# Altium footprint library 2.11-TQFP封装.PcbLib: 71 footprints (part 4 of 5)
Each footprint in its own frame and in the unit in brackets; x right, y up, seen from the top. Pads: shape width x height; smd on the part's side, far side on the other; paste and mask are expansions set on the pad; w line width, h text height; cw(c..) or ccw(c..) is an arc to the next point about the centre after c.
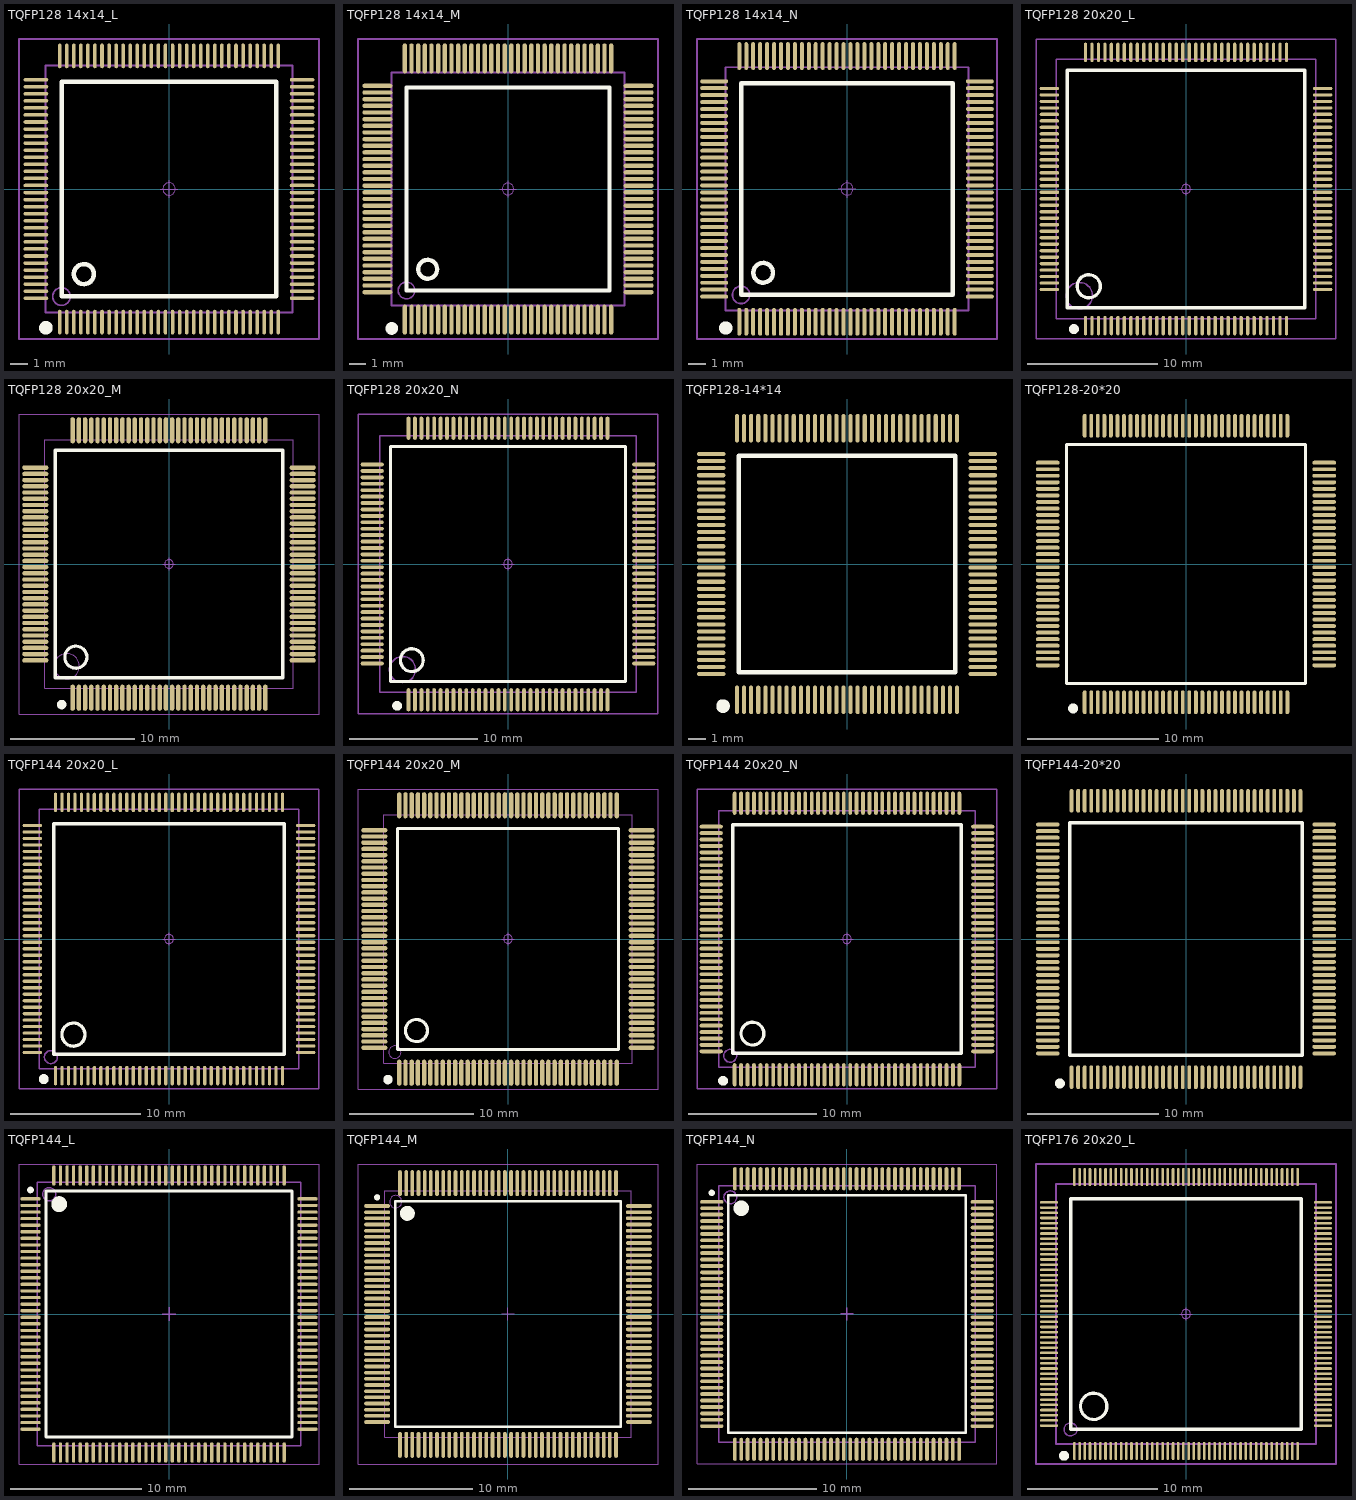
[diagram p3: the footprints below, top view; thin cyan lines are the x and y axes]

## TQFP128 14x14_L [mm] "128脚，体宽：14x14mm, 脚距：0.4mm"
pads (128):
  oval 0.2x1.4 smd: 1(-6.2,-7.549) 2(-5.8,-7.549) 3(-5.4,-7.549) 4(-5,-7.549) 5(-4.6,-7.549) 6(-4.2,-7.549) 7(-3.8,-7.549) 8(-3.4,-7.549) 9(-3,-7.549) 10(-2.6,-7.549) 11(-2.2,-7.549) 12(-1.8,-7.549) 13(-1.4,-7.549) 14(-1,-7.549) 15(-0.6,-7.549) 16(-0.2,-7.549) 17(0.2,-7.549) 18(0.6,-7.549) 19(1,-7.549) 20(1.4,-7.549) 21(1.8,-7.549) 22(2.2,-7.549) 23(2.6,-7.549) 24(3,-7.549) 25(3.4,-7.549) 26(3.8,-7.549) 27(4.2,-7.549) 28(4.6,-7.549) 29(5,-7.549) 30(5.4,-7.549) 31(5.8,-7.549) 32(6.2,-7.549) 65(6.2,7.549) 66(5.8,7.549) 67(5.4,7.549) 68(5,7.549) 69(4.6,7.549) 70(4.2,7.549) 71(3.8,7.549) 72(3.4,7.549) 73(3,7.549) 74(2.6,7.549) 75(2.2,7.549) 76(1.8,7.549) 77(1.4,7.549) 78(1,7.549) 79(0.6,7.549) 80(0.2,7.549) 81(-0.2,7.549) 82(-0.6,7.549) 83(-1,7.549) 84(-1.4,7.549) 85(-1.8,7.549) 86(-2.2,7.549) 87(-2.6,7.549) 88(-3,7.549) 89(-3.4,7.549) 90(-3.8,7.549) 91(-4.2,7.549) 92(-4.6,7.549) 93(-5,7.549) 94(-5.4,7.549) 95(-5.8,7.549) 96(-6.2,7.549)
  oval 1.4x0.2 smd: 33(7.549,-6.2) 34(7.549,-5.8) 35(7.549,-5.4) 36(7.549,-5) 37(7.549,-4.6) 38(7.549,-4.2) 39(7.549,-3.8) 40(7.549,-3.4) 41(7.549,-3) 42(7.549,-2.6) 43(7.549,-2.2) 44(7.549,-1.8) 45(7.549,-1.4) 46(7.549,-1) 47(7.549,-0.6) 48(7.549,-0.2) 49(7.549,0.2) 50(7.549,0.6) 51(7.549,1) 52(7.549,1.4) 53(7.549,1.8) 54(7.549,2.2) 55(7.549,2.6) 56(7.549,3) 57(7.549,3.4) 58(7.549,3.8) 59(7.549,4.2) 60(7.549,4.6) 61(7.549,5) 62(7.549,5.4) 63(7.549,5.8) 64(7.549,6.2) 97(-7.549,6.2) 98(-7.549,5.8) 99(-7.549,5.4) 100(-7.549,5) 101(-7.549,4.6) 102(-7.549,4.2) 103(-7.549,3.8) 104(-7.549,3.4) 105(-7.549,3) 106(-7.549,2.6) 107(-7.549,2.2) 108(-7.549,1.8) 109(-7.549,1.4) 110(-7.549,1) 111(-7.549,0.6) 112(-7.549,0.2) 113(-7.549,-0.2) 114(-7.549,-0.6) 115(-7.549,-1) 116(-7.549,-1.4) 117(-7.549,-1.8) 118(-7.549,-2.2) 119(-7.549,-2.6) 120(-7.549,-3) 121(-7.549,-3.4) 122(-7.549,-3.8) 123(-7.549,-4.2) 124(-7.549,-4.6) 125(-7.549,-5) 126(-7.549,-5.4) 127(-7.549,-5.8) 128(-7.549,-6.2)
Top Overlay:
  circle w0.254: c-4.826,-4.826 r0.568
  circle w0.508: c-6.985,-7.874 r0.127
  lines w0.254: -6.096,-6.096 -6.096,6.096 6.096,6.096 6.096,-6.096 -6.096,-6.096
Mechanical 13:
  circle w0.1: c-6.1,-6.1 r0.5
  lines w0.1: -7,-7 7,-7 7,7 -7,7 -7,-7
Mechanical 15:
  circle w0.05: c0,0 r0.35
  lines w0.05: -0.5,0 0.5,0 ; 0,-0.5 0,0.5
  lines w0.1: -8.509,-8.509 -8.509,8.509 8.509,8.509 8.509,-8.509 -8.509,-8.509
3D body "TQFP128 14x14.STEP": height 1.05, standoff -0.01, extent -8.002,-8.002 8.002,8.002

## TQFP128 14x14_M [mm] "128脚，体宽：14x14mm, 脚距：0.4mm"
pads (128):
  oval 0.26x1.8 smd: 1(-6.2,-7.854) 2(-5.8,-7.854) 3(-5.4,-7.854) 4(-5,-7.854) 5(-4.6,-7.854) 6(-4.2,-7.854) 7(-3.8,-7.854) 8(-3.4,-7.854) 9(-3,-7.854) 10(-2.6,-7.854) 11(-2.2,-7.854) 12(-1.8,-7.854) 13(-1.4,-7.854) 14(-1,-7.854) 15(-0.6,-7.854) 16(-0.2,-7.854) 17(0.2,-7.854) 18(0.6,-7.854) 19(1,-7.854) 20(1.4,-7.854) 21(1.8,-7.854) 22(2.2,-7.854) 23(2.6,-7.854) 24(3,-7.854) 25(3.4,-7.854) 26(3.8,-7.854) 27(4.2,-7.854) 28(4.6,-7.854) 29(5,-7.854) 30(5.4,-7.854) 31(5.8,-7.854) 32(6.2,-7.854) 65(6.2,7.854) 66(5.8,7.854) 67(5.4,7.854) 68(5,7.854) 69(4.6,7.854) 70(4.2,7.854) 71(3.8,7.854) 72(3.4,7.854) 73(3,7.854) 74(2.6,7.854) 75(2.2,7.854) 76(1.8,7.854) 77(1.4,7.854) 78(1,7.854) 79(0.6,7.854) 80(0.2,7.854) 81(-0.2,7.854) 82(-0.6,7.854) 83(-1,7.854) 84(-1.4,7.854) 85(-1.8,7.854) 86(-2.2,7.854) 87(-2.6,7.854) 88(-3,7.854) 89(-3.4,7.854) 90(-3.8,7.854) 91(-4.2,7.854) 92(-4.6,7.854) 93(-5,7.854) 94(-5.4,7.854) 95(-5.8,7.854) 96(-6.2,7.854)
  oval 1.8x0.26 smd: 33(7.854,-6.2) 34(7.854,-5.8) 35(7.854,-5.4) 36(7.854,-5) 37(7.854,-4.6) 38(7.854,-4.2) 39(7.854,-3.8) 40(7.854,-3.4) 41(7.854,-3) 42(7.854,-2.6) 43(7.854,-2.2) 44(7.854,-1.8) 45(7.854,-1.4) 46(7.854,-1) 47(7.854,-0.6) 48(7.854,-0.2) 49(7.854,0.2) 50(7.854,0.6) 51(7.854,1) 52(7.854,1.4) 53(7.854,1.8) 54(7.854,2.2) 55(7.854,2.6) 56(7.854,3) 57(7.854,3.4) 58(7.854,3.8) 59(7.854,4.2) 60(7.854,4.6) 61(7.854,5) 62(7.854,5.4) 63(7.854,5.8) 64(7.854,6.2) 97(-7.854,6.2) 98(-7.854,5.8) 99(-7.854,5.4) 100(-7.854,5) 101(-7.854,4.6) 102(-7.854,4.2) 103(-7.854,3.8) 104(-7.854,3.4) 105(-7.854,3) 106(-7.854,2.6) 107(-7.854,2.2) 108(-7.854,1.8) 109(-7.854,1.4) 110(-7.854,1) 111(-7.854,0.6) 112(-7.854,0.2) 113(-7.854,-0.2) 114(-7.854,-0.6) 115(-7.854,-1) 116(-7.854,-1.4) 117(-7.854,-1.8) 118(-7.854,-2.2) 119(-7.854,-2.6) 120(-7.854,-3) 121(-7.854,-3.4) 122(-7.854,-3.8) 123(-7.854,-4.2) 124(-7.854,-4.6) 125(-7.854,-5) 126(-7.854,-5.4) 127(-7.854,-5.8) 128(-7.854,-6.2)
Top Overlay:
  circle w0.254: c-4.826,-4.826 r0.568
  circle w0.508: c-6.985,-8.382 r0.127
  lines w0.254: -6.096,-6.096 -6.096,6.096 6.096,6.096 6.096,-6.096 -6.096,-6.096
Mechanical 13:
  circle w0.1: c-6.1,-6.1 r0.5
  lines w0.1: -7,-7 7,-7 7,7 -7,7 -7,-7
Mechanical 15:
  circle w0.05: c0,0 r0.35
  lines w0.05: -0.5,0 0.5,0 ; 0,-0.5 0,0.5
  lines w0.1: -9.017,-9.017 -9.017,9.017 9.017,9.017 9.017,-9.017 -9.017,-9.017
3D body "TQFP128 14x14.STEP": height 1.05, standoff -0.01, extent -8.002,-8.002 8.002,8.002

## TQFP128 14x14_N [mm] "128脚，体宽：14x14mm, 脚距：0.4mm"
pads (128):
  oval 0.23x1.6 smd: 1(-6.2,-7.648) 2(-5.8,-7.648) 3(-5.4,-7.648) 4(-5,-7.648) 5(-4.6,-7.648) 6(-4.2,-7.648) 7(-3.8,-7.648) 8(-3.4,-7.648) 9(-3,-7.648) 10(-2.6,-7.648) 11(-2.2,-7.648) 12(-1.8,-7.648) 13(-1.4,-7.648) 14(-1,-7.648) 15(-0.6,-7.648) 16(-0.2,-7.648) 17(0.2,-7.648) 18(0.6,-7.648) 19(1,-7.648) 20(1.4,-7.648) 21(1.8,-7.648) 22(2.2,-7.648) 23(2.6,-7.648) 24(3,-7.648) 25(3.4,-7.648) 26(3.8,-7.648) 27(4.2,-7.648) 28(4.6,-7.648) 29(5,-7.648) 30(5.4,-7.648) 31(5.8,-7.648) 32(6.2,-7.648) 65(6.2,7.653) 66(5.8,7.653) 67(5.4,7.653) 68(5,7.653) 69(4.6,7.653) 70(4.2,7.653) 71(3.8,7.653) 72(3.4,7.653) 73(3,7.653) 74(2.6,7.653) 75(2.2,7.653) 76(1.8,7.653) 77(1.4,7.653) 78(1,7.653) 79(0.6,7.653) 80(0.2,7.653) 81(-0.2,7.653) 82(-0.6,7.653) 83(-1,7.653) 84(-1.4,7.653) 85(-1.8,7.653) 86(-2.2,7.653) 87(-2.6,7.653) 88(-3,7.653) 89(-3.4,7.653) 90(-3.8,7.653) 91(-4.2,7.653) 92(-4.6,7.653) 93(-5,7.653) 94(-5.4,7.653) 95(-5.8,7.653) 96(-6.2,7.653)
  oval 1.6x0.23 smd: 33(7.651,-6.198) 34(7.651,-5.798) 35(7.651,-5.398) 36(7.651,-4.998) 37(7.651,-4.598) 38(7.651,-4.198) 39(7.651,-3.798) 40(7.651,-3.398) 41(7.651,-2.998) 42(7.651,-2.598) 43(7.651,-2.198) 44(7.651,-1.798) 45(7.651,-1.398) 46(7.651,-0.998) 47(7.651,-0.598) 48(7.651,-0.198) 49(7.651,0.202) 50(7.651,0.602) 51(7.651,1.002) 52(7.651,1.402) 53(7.651,1.802) 54(7.651,2.202) 55(7.651,2.602) 56(7.651,3.002) 57(7.651,3.402) 58(7.651,3.802) 59(7.651,4.202) 60(7.651,4.602) 61(7.651,5.002) 62(7.651,5.402) 63(7.651,5.802) 64(7.651,6.202) 97(-7.651,6.202) 98(-7.651,5.802) 99(-7.651,5.402) 100(-7.651,5.002) 101(-7.651,4.602) 102(-7.651,4.202) 103(-7.651,3.802) 104(-7.651,3.402) 105(-7.651,3.002) 106(-7.651,2.602) 107(-7.651,2.202) 108(-7.651,1.802) 109(-7.651,1.402) 110(-7.651,1.002) 111(-7.651,0.602) 112(-7.651,0.202) 113(-7.651,-0.198) 114(-7.651,-0.598) 115(-7.651,-0.998) 116(-7.651,-1.398) 117(-7.651,-1.798) 118(-7.651,-2.198) 119(-7.651,-2.598) 120(-7.651,-2.998) 121(-7.651,-3.398) 122(-7.651,-3.798) 123(-7.651,-4.198) 124(-7.651,-4.598) 125(-7.651,-4.998) 126(-7.651,-5.398) 127(-7.651,-5.798) 128(-7.651,-6.198)
Top Overlay:
  circle w0.254: c-4.826,-4.824 r0.568
  circle w0.508: c-6.985,-8.001 r0.127
  lines w0.254: -6.096,-6.094 -6.096,6.098 6.096,6.098 6.096,-6.094 -6.096,-6.094
Mechanical 13:
  circle w0.1: c-6.1,-6.098 r0.5
  lines w0.1: -7,-6.998 7,-6.998 7,7.002 -7,7.002 -7,-6.998
Mechanical 15:
  circle w0.05: c0,0.002 r0.35
  lines w0.05: -0.5,0.002 0.5,0.002 ; 0,-0.498 0,0.502
  lines w0.1: -8.636,-8.636 -8.636,8.636 8.636,8.636 8.636,-8.636 -8.636,-8.636
3D body "TQFP128 14x14.STEP": height 1.05, standoff -0.01, extent -8.002,-8 8.002,8.005

## TQFP128 20x20_L [mm] "128脚，体宽：20x20mm, 脚距：0.5mm"
pads (128):
  oval 0.25x1.5 smd: 1(-7.75,-10.525) 2(-7.25,-10.525) 3(-6.75,-10.525) 4(-6.25,-10.525) 5(-5.75,-10.525) 6(-5.25,-10.525) 7(-4.75,-10.525) 8(-4.25,-10.525) 9(-3.75,-10.525) 10(-3.25,-10.525) 11(-2.75,-10.525) 12(-2.25,-10.525) 13(-1.75,-10.525) 14(-1.25,-10.525) 15(-0.75,-10.525) 16(-0.25,-10.525) 17(0.25,-10.525) 18(0.75,-10.525) 19(1.25,-10.525) 20(1.75,-10.525) 21(2.25,-10.525) 22(2.75,-10.525) 23(3.25,-10.525) 24(3.75,-10.525) 25(4.25,-10.525) 26(4.75,-10.525) 27(5.25,-10.525) 28(5.75,-10.525) 29(6.25,-10.525) 30(6.75,-10.525) 31(7.25,-10.525) 32(7.75,-10.525) 65(7.75,10.525) 66(7.25,10.525) 67(6.75,10.525) 68(6.25,10.525) 69(5.75,10.525) 70(5.25,10.525) 71(4.75,10.525) 72(4.25,10.525) 73(3.75,10.525) 74(3.25,10.525) 75(2.75,10.525) 76(2.25,10.525) 77(1.75,10.525) 78(1.25,10.525) 79(0.75,10.525) 80(0.25,10.525) 81(-0.25,10.525) 82(-0.75,10.525) 83(-1.25,10.525) 84(-1.75,10.525) 85(-2.25,10.525) 86(-2.75,10.525) 87(-3.25,10.525) 88(-3.75,10.525) 89(-4.25,10.525) 90(-4.75,10.525) 91(-5.25,10.525) 92(-5.75,10.525) 93(-6.25,10.525) 94(-6.75,10.525) 95(-7.25,10.525) 96(-7.75,10.525)
  oval 1.5x0.25 smd: 33(10.525,-7.75) 34(10.525,-7.25) 35(10.525,-6.75) 36(10.525,-6.25) 37(10.525,-5.75) 38(10.525,-5.25) 39(10.525,-4.75) 40(10.525,-4.25) 41(10.525,-3.75) 42(10.525,-3.25) 43(10.525,-2.75) 44(10.525,-2.25) 45(10.525,-1.75) 46(10.525,-1.25) 47(10.525,-0.75) 48(10.525,-0.25) 49(10.525,0.25) 50(10.525,0.75) 51(10.525,1.25) 52(10.525,1.75) 53(10.525,2.25) 54(10.525,2.75) 55(10.525,3.25) 56(10.525,3.75) 57(10.525,4.25) 58(10.525,4.75) 59(10.525,5.25) 60(10.525,5.75) 61(10.525,6.25) 62(10.525,6.75) 63(10.525,7.25) 64(10.525,7.75) 97(-10.525,7.75) 98(-10.525,7.25) 99(-10.525,6.75) 100(-10.525,6.25) 101(-10.525,5.75) 102(-10.525,5.25) 103(-10.525,4.75) 104(-10.525,4.25) 105(-10.525,3.75) 106(-10.525,3.25) 107(-10.525,2.75) 108(-10.525,2.25) 109(-10.525,1.75) 110(-10.525,1.25) 111(-10.525,0.75) 112(-10.525,0.25) 113(-10.525,-0.25) 114(-10.525,-0.75) 115(-10.525,-1.25) 116(-10.525,-1.75) 117(-10.525,-2.25) 118(-10.525,-2.75) 119(-10.525,-3.25) 120(-10.525,-3.75) 121(-10.525,-4.25) 122(-10.525,-4.75) 123(-10.525,-5.25) 124(-10.525,-5.75) 125(-10.525,-6.25) 126(-10.525,-6.75) 127(-10.525,-7.25) 128(-10.525,-7.75)
Top Overlay:
  circle w0.254: c-7.493,-7.493 r0.889
  circle w0.508: c-8.636,-10.795 r0.127
  lines w0.254: -9.144,-9.144 -9.144,9.144 9.144,9.144 9.144,-9.144 -9.144,-9.144
Mechanical 13:
  circle w0.1: c-8.222,-8.222 r1.016
  lines w0.1: -10,-10 10,-10 10,10 -10,10 -10,-10
Mechanical 15:
  circle w0.05: c0,0 r0.35
  lines w0.05: -0.5,0 0.5,0 ; 0,-0.5 0,0.5
  lines w0.1: -11.557,-11.557 -11.557,11.557 11.557,11.557 11.557,-11.557 -11.557,-11.557
3D body "TQFP128 20x20.STEP": height 1.05, standoff -0.01, extent -11.002,-11.002 11.002,11.002

## TQFP128 20x20_M [mm] "128脚，体宽：20x20mm, 脚距：0.5mm"
pads (128):
  oval 0.35x2.1 smd: 1(-7.75,-10.754) 2(-7.25,-10.754) 3(-6.75,-10.754) 4(-6.25,-10.754) 5(-5.75,-10.754) 6(-5.25,-10.754) 7(-4.75,-10.754) 8(-4.25,-10.754) 9(-3.75,-10.754) 10(-3.25,-10.754) 11(-2.75,-10.754) 12(-2.25,-10.754) 13(-1.75,-10.754) 14(-1.25,-10.754) 15(-0.75,-10.754) 16(-0.25,-10.754) 17(0.25,-10.754) 18(0.75,-10.754) 19(1.25,-10.754) 20(1.75,-10.754) 21(2.25,-10.754) 22(2.75,-10.754) 23(3.25,-10.754) 24(3.75,-10.754) 25(4.25,-10.754) 26(4.75,-10.754) 27(5.25,-10.754) 28(5.75,-10.754) 29(6.25,-10.754) 30(6.75,-10.754) 31(7.25,-10.754) 32(7.75,-10.754) 65(7.75,10.754) 66(7.25,10.754) 67(6.75,10.754) 68(6.25,10.754) 69(5.75,10.754) 70(5.25,10.754) 71(4.75,10.754) 72(4.25,10.754) 73(3.75,10.754) 74(3.25,10.754) 75(2.75,10.754) 76(2.25,10.754) 77(1.75,10.754) 78(1.25,10.754) 79(0.75,10.754) 80(0.25,10.754) 81(-0.25,10.754) 82(-0.75,10.754) 83(-1.25,10.754) 84(-1.75,10.754) 85(-2.25,10.754) 86(-2.75,10.754) 87(-3.25,10.754) 88(-3.75,10.754) 89(-4.25,10.754) 90(-4.75,10.754) 91(-5.25,10.754) 92(-5.75,10.754) 93(-6.25,10.754) 94(-6.75,10.754) 95(-7.25,10.754) 96(-7.75,10.754)
  oval 2.1x0.35 smd: 33(10.754,-7.75) 34(10.754,-7.25) 35(10.754,-6.75) 36(10.754,-6.25) 37(10.754,-5.75) 38(10.754,-5.25) 39(10.754,-4.75) 40(10.754,-4.25) 41(10.754,-3.75) 42(10.754,-3.25) 43(10.754,-2.75) 44(10.754,-2.25) 45(10.754,-1.75) 46(10.754,-1.25) 47(10.754,-0.75) 48(10.754,-0.25) 49(10.754,0.25) 50(10.754,0.75) 51(10.754,1.25) 52(10.754,1.75) 53(10.754,2.25) 54(10.754,2.75) 55(10.754,3.25) 56(10.754,3.75) 57(10.754,4.25) 58(10.754,4.75) 59(10.754,5.25) 60(10.754,5.75) 61(10.754,6.25) 62(10.754,6.75) 63(10.754,7.25) 64(10.754,7.75) 97(-10.754,7.75) 98(-10.754,7.25) 99(-10.754,6.75) 100(-10.754,6.25) 101(-10.754,5.75) 102(-10.754,5.25) 103(-10.754,4.75) 104(-10.754,4.25) 105(-10.754,3.75) 106(-10.754,3.25) 107(-10.754,2.75) 108(-10.754,2.25) 109(-10.754,1.75) 110(-10.754,1.25) 111(-10.754,0.75) 112(-10.754,0.25) 113(-10.754,-0.25) 114(-10.754,-0.75) 115(-10.754,-1.25) 116(-10.754,-1.75) 117(-10.754,-2.25) 118(-10.754,-2.75) 119(-10.754,-3.25) 120(-10.754,-3.75) 121(-10.754,-4.25) 122(-10.754,-4.75) 123(-10.754,-5.25) 124(-10.754,-5.75) 125(-10.754,-6.25) 126(-10.754,-6.75) 127(-10.754,-7.25) 128(-10.754,-7.75)
Top Overlay:
  circle w0.508: c-8.636,-11.303 r0.127
  circle w0.254: c-7.493,-7.493 r0.889
  lines w0.254: -9.144,-9.144 9.144,-9.144 9.144,9.144 -9.144,9.144 -9.144,-9.144
Mechanical 13:
  circle w0.1: c-8.222,-8.222 r1.016
  lines w0.1: -10,-10 -10,10 10,10 10,-10 -10,-10
Mechanical 15:
  circle w0.05: c0,0 r0.35
  lines w0.05: -0.5,0 0.5,0 ; 0,-0.5 0,0.5
  lines w0.1: -12.065,-12.065 12.065,-12.065 12.065,12.065 -12.065,12.065 -12.065,-12.065
3D body "TQFP128 20x20.STEP": height 1.05, standoff -0.01, extent -11.002,-11.002 11.002,11.002

## TQFP128 20x20_N [mm] "128脚，体宽：20x20mm, 脚距：0.5mm          淘宝ID:黄晶宝石"
pads (128):
  oval 0.3x1.8 smd: 1(-7.75,-10.576) 2(-7.25,-10.576) 3(-6.75,-10.576) 4(-6.25,-10.576) 5(-5.75,-10.576) 6(-5.25,-10.576) 7(-4.75,-10.576) 8(-4.25,-10.576) 9(-3.75,-10.576) 10(-3.25,-10.576) 11(-2.75,-10.576) 12(-2.25,-10.576) 13(-1.75,-10.576) 14(-1.25,-10.576) 15(-0.75,-10.576) 16(-0.25,-10.576) 17(0.25,-10.576) 18(0.75,-10.576) 19(1.25,-10.576) 20(1.75,-10.576) 21(2.25,-10.576) 22(2.75,-10.576) 23(3.25,-10.576) 24(3.75,-10.576) 25(4.25,-10.576) 26(4.75,-10.576) 27(5.25,-10.576) 28(5.75,-10.576) 29(6.25,-10.576) 30(6.75,-10.576) 31(7.25,-10.576) 32(7.75,-10.576) 65(7.75,10.576) 66(7.25,10.576) 67(6.75,10.576) 68(6.25,10.576) 69(5.75,10.576) 70(5.25,10.576) 71(4.75,10.576) 72(4.25,10.576) 73(3.75,10.576) 74(3.25,10.576) 75(2.75,10.576) 76(2.25,10.576) 77(1.75,10.576) 78(1.25,10.576) 79(0.75,10.576) 80(0.25,10.576) 81(-0.25,10.576) 82(-0.75,10.576) 83(-1.25,10.576) 84(-1.75,10.576) 85(-2.25,10.576) 86(-2.75,10.576) 87(-3.25,10.576) 88(-3.75,10.576) 89(-4.25,10.576) 90(-4.75,10.576) 91(-5.25,10.576) 92(-5.75,10.576) 93(-6.25,10.576) 94(-6.75,10.576) 95(-7.25,10.576) 96(-7.75,10.576)
  oval 1.8x0.3 smd: 33(10.576,-7.75) 34(10.576,-7.25) 35(10.576,-6.75) 36(10.576,-6.25) 37(10.576,-5.75) 38(10.576,-5.25) 39(10.576,-4.75) 40(10.576,-4.25) 41(10.576,-3.75) 42(10.576,-3.25) 43(10.576,-2.75) 44(10.576,-2.25) 45(10.576,-1.75) 46(10.576,-1.25) 47(10.576,-0.75) 48(10.576,-0.25) 49(10.576,0.25) 50(10.576,0.75) 51(10.576,1.25) 52(10.576,1.75) 53(10.576,2.25) 54(10.576,2.75) 55(10.576,3.25) 56(10.576,3.75) 57(10.576,4.25) 58(10.576,4.75) 59(10.576,5.25) 60(10.576,5.75) 61(10.576,6.25) 62(10.576,6.75) 63(10.576,7.25) 64(10.576,7.75) 97(-10.576,7.75) 98(-10.576,7.25) 99(-10.576,6.75) 100(-10.576,6.25) 101(-10.576,5.75) 102(-10.576,5.25) 103(-10.576,4.75) 104(-10.576,4.25) 105(-10.576,3.75) 106(-10.576,3.25) 107(-10.576,2.75) 108(-10.576,2.25) 109(-10.576,1.75) 110(-10.576,1.25) 111(-10.576,0.75) 112(-10.576,0.25) 113(-10.576,-0.25) 114(-10.576,-0.75) 115(-10.576,-1.25) 116(-10.576,-1.75) 117(-10.576,-2.25) 118(-10.576,-2.75) 119(-10.576,-3.25) 120(-10.576,-3.75) 121(-10.576,-4.25) 122(-10.576,-4.75) 123(-10.576,-5.25) 124(-10.576,-5.75) 125(-10.576,-6.25) 126(-10.576,-6.75) 127(-10.576,-7.25) 128(-10.576,-7.75)
Top Overlay:
  circle w0.508: c-8.636,-11.049 r0.127
  circle w0.254: c-7.493,-7.493 r0.889
  lines w0.254: -9.144,-9.144 -9.144,9.144 9.144,9.144 9.144,-9.144 -9.144,-9.144
Mechanical 13:
  circle w0.1: c-8.222,-8.222 r1.016
  lines w0.1: -10,-10 10,-10 10,10 -10,10 -10,-10
Mechanical 15:
  circle w0.05: c0,0 r0.35
  lines w0.05: -0.5,0 0.5,0 ; 0,-0.5 0,0.5
  lines w0.1: -11.684,-11.684 -11.684,11.684 11.684,11.684 11.684,-11.684 -11.684,-11.684
3D body "TQFP128 20x20.STEP": height 1.05, standoff -0.01, extent -11.002,-11.002 11.002,11.002

## TQFP128-14*14 [mm] "14x14mm, 0.4mm     封装库来自淘宝卖家 ID：黄晶宝石"
pads (128):
  oval 0.23x1.6 smd: 1(-6.2,-7.648) 2(-5.8,-7.648) 3(-5.4,-7.648) 4(-5,-7.648) 5(-4.6,-7.648) 6(-4.2,-7.648) 7(-3.8,-7.648) 8(-3.4,-7.648) 9(-3,-7.648) 10(-2.6,-7.648) 11(-2.2,-7.648) 12(-1.8,-7.648) 13(-1.4,-7.648) 14(-1,-7.648) 15(-0.6,-7.648) 16(-0.2,-7.648) 17(0.2,-7.648) 18(0.6,-7.648) 19(1,-7.648) 20(1.4,-7.648) 21(1.8,-7.648) 22(2.2,-7.648) 23(2.6,-7.648) 24(3,-7.648) 25(3.4,-7.648) 26(3.8,-7.648) 27(4.2,-7.648) 28(4.6,-7.648) 29(5,-7.648) 30(5.4,-7.648) 31(5.8,-7.648) 32(6.2,-7.648) 65(6.2,7.653) 66(5.8,7.653) 67(5.4,7.653) 68(5,7.653) 69(4.6,7.653) 70(4.2,7.653) 71(3.8,7.653) 72(3.4,7.653) 73(3,7.653) 74(2.6,7.653) 75(2.2,7.653) 76(1.8,7.653) 77(1.4,7.653) 78(1,7.653) 79(0.6,7.653) 80(0.2,7.653) 81(-0.2,7.653) 82(-0.6,7.653) 83(-1,7.653) 84(-1.4,7.653) 85(-1.8,7.653) 86(-2.2,7.653) 87(-2.6,7.653) 88(-3,7.653) 89(-3.4,7.653) 90(-3.8,7.653) 91(-4.2,7.653) 92(-4.6,7.653) 93(-5,7.653) 94(-5.4,7.653) 95(-5.8,7.653) 96(-6.2,7.653)
  oval 1.6x0.23 smd: 33(7.651,-6.198) 34(7.651,-5.798) 35(7.651,-5.398) 36(7.651,-4.998) 37(7.651,-4.598) 38(7.651,-4.198) 39(7.651,-3.798) 40(7.651,-3.398) 41(7.651,-2.998) 42(7.651,-2.598) 43(7.651,-2.198) 44(7.651,-1.798) 45(7.651,-1.398) 46(7.651,-0.998) 47(7.651,-0.598) 48(7.651,-0.198) 49(7.651,0.202) 50(7.651,0.602) 51(7.651,1.002) 52(7.651,1.402) 53(7.651,1.802) 54(7.651,2.202) 55(7.651,2.602) 56(7.651,3.002) 57(7.651,3.402) 58(7.651,3.802) 59(7.651,4.202) 60(7.651,4.602) 61(7.651,5.002) 62(7.651,5.402) 63(7.651,5.802) 64(7.651,6.202) 97(-7.651,6.202) 98(-7.651,5.802) 99(-7.651,5.402) 100(-7.651,5.002) 101(-7.651,4.602) 102(-7.651,4.202) 103(-7.651,3.802) 104(-7.651,3.402) 105(-7.651,3.002) 106(-7.651,2.602) 107(-7.651,2.202) 108(-7.651,1.802) 109(-7.651,1.402) 110(-7.651,1.002) 111(-7.651,0.602) 112(-7.651,0.202) 113(-7.651,-0.198) 114(-7.651,-0.598) 115(-7.651,-0.998) 116(-7.651,-1.398) 117(-7.651,-1.798) 118(-7.651,-2.198) 119(-7.651,-2.598) 120(-7.651,-2.998) 121(-7.651,-3.398) 122(-7.651,-3.798) 123(-7.651,-4.198) 124(-7.651,-4.598) 125(-7.651,-4.998) 126(-7.651,-5.398) 127(-7.651,-5.798) 128(-7.651,-6.198)
Top Overlay:
  circle w0.508: c-6.985,-8.001 r0.127
  lines w0.254: -6.096,-6.094 6.096,-6.094 6.096,6.098 -6.096,6.098 -6.096,-6.094
3D body "TQFP128_14x14.STEP": height 1.05, standoff 0, extent -8.002,-8.002 8.002,8.002

## TQFP128-20*20 [mm] "20x20mm, 0.5mm      封装库来自淘宝卖家 ID：黄晶宝石"
pads (128):
  oval 0.3x1.8 smd: 1(-7.75,-10.576) 2(-7.25,-10.576) 3(-6.75,-10.576) 4(-6.25,-10.576) 5(-5.75,-10.576) 6(-5.25,-10.576) 7(-4.75,-10.576) 8(-4.25,-10.576) 9(-3.75,-10.576) 10(-3.25,-10.576) 11(-2.75,-10.576) 12(-2.25,-10.576) 13(-1.75,-10.576) 14(-1.25,-10.576) 15(-0.75,-10.576) 16(-0.25,-10.576) 17(0.25,-10.576) 18(0.75,-10.576) 19(1.25,-10.576) 20(1.75,-10.576) 21(2.25,-10.576) 22(2.75,-10.576) 23(3.25,-10.576) 24(3.75,-10.576) 25(4.25,-10.576) 26(4.75,-10.576) 27(5.25,-10.576) 28(5.75,-10.576) 29(6.25,-10.576) 30(6.75,-10.576) 31(7.25,-10.576) 32(7.75,-10.576) 65(7.75,10.576) 66(7.25,10.576) 67(6.75,10.576) 68(6.25,10.576) 69(5.75,10.576) 70(5.25,10.576) 71(4.75,10.576) 72(4.25,10.576) 73(3.75,10.576) 74(3.25,10.576) 75(2.75,10.576) 76(2.25,10.576) 77(1.75,10.576) 78(1.25,10.576) 79(0.75,10.576) 80(0.25,10.576) 81(-0.25,10.576) 82(-0.75,10.576) 83(-1.25,10.576) 84(-1.75,10.576) 85(-2.25,10.576) 86(-2.75,10.576) 87(-3.25,10.576) 88(-3.75,10.576) 89(-4.25,10.576) 90(-4.75,10.576) 91(-5.25,10.576) 92(-5.75,10.576) 93(-6.25,10.576) 94(-6.75,10.576) 95(-7.25,10.576) 96(-7.75,10.576)
  oval 1.8x0.3 smd: 33(10.576,-7.75) 34(10.576,-7.25) 35(10.576,-6.75) 36(10.576,-6.25) 37(10.576,-5.75) 38(10.576,-5.25) 39(10.576,-4.75) 40(10.576,-4.25) 41(10.576,-3.75) 42(10.576,-3.25) 43(10.576,-2.75) 44(10.576,-2.25) 45(10.576,-1.75) 46(10.576,-1.25) 47(10.576,-0.75) 48(10.576,-0.25) 49(10.576,0.25) 50(10.576,0.75) 51(10.576,1.25) 52(10.576,1.75) 53(10.576,2.25) 54(10.576,2.75) 55(10.576,3.25) 56(10.576,3.75) 57(10.576,4.25) 58(10.576,4.75) 59(10.576,5.25) 60(10.576,5.75) 61(10.576,6.25) 62(10.576,6.75) 63(10.576,7.25) 64(10.576,7.75) 97(-10.576,7.75) 98(-10.576,7.25) 99(-10.576,6.75) 100(-10.576,6.25) 101(-10.576,5.75) 102(-10.576,5.25) 103(-10.576,4.75) 104(-10.576,4.25) 105(-10.576,3.75) 106(-10.576,3.25) 107(-10.576,2.75) 108(-10.576,2.25) 109(-10.576,1.75) 110(-10.576,1.25) 111(-10.576,0.75) 112(-10.576,0.25) 113(-10.576,-0.25) 114(-10.576,-0.75) 115(-10.576,-1.25) 116(-10.576,-1.75) 117(-10.576,-2.25) 118(-10.576,-2.75) 119(-10.576,-3.25) 120(-10.576,-3.75) 121(-10.576,-4.25) 122(-10.576,-4.75) 123(-10.576,-5.25) 124(-10.576,-5.75) 125(-10.576,-6.25) 126(-10.576,-6.75) 127(-10.576,-7.25) 128(-10.576,-7.75)
Top Overlay:
  circle w0.508: c-8.636,-11.049 r0.127
  lines w0.254: -9.144,-9.144 -9.144,9.144 9.144,9.144 9.144,-9.144 -9.144,-9.144
3D body "TQFP128_20x20.STEP": height 1.05, standoff 0, extent -11.002,-11.002 11.002,11.002

## TQFP144 20x20_L [mm] "144脚，体宽：20x20mm, 脚距：0.5mm"
height 1.6
pads (144):
  oval 0.25x1.5 smd: 1(-8.75,-10.525) 2(-8.25,-10.525) 3(-7.75,-10.525) 4(-7.25,-10.525) 5(-6.75,-10.525) 6(-6.25,-10.525) 7(-5.75,-10.525) 8(-5.25,-10.525) 9(-4.75,-10.525) 10(-4.25,-10.525) 11(-3.75,-10.525) 12(-3.25,-10.525) 13(-2.75,-10.525) 14(-2.25,-10.525) 15(-1.75,-10.525) 16(-1.25,-10.525) 17(-0.75,-10.525) 18(-0.25,-10.525) 19(0.25,-10.525) 20(0.75,-10.525) 21(1.25,-10.525) 22(1.75,-10.525) 23(2.25,-10.525) 24(2.75,-10.525) 25(3.25,-10.525) 26(3.75,-10.525) 27(4.25,-10.525) 28(4.75,-10.525) 29(5.25,-10.525) 30(5.75,-10.525) 31(6.25,-10.525) 32(6.75,-10.525) 33(7.25,-10.525) 34(7.75,-10.525) 35(8.25,-10.525) 36(8.75,-10.525) 73(8.75,10.525) 74(8.25,10.525) 75(7.75,10.525) 76(7.25,10.525) 77(6.75,10.525) 78(6.25,10.525) 79(5.75,10.525) 80(5.25,10.525) 81(4.75,10.525) 82(4.25,10.525) 83(3.75,10.525) 84(3.25,10.525) 85(2.75,10.525) 86(2.25,10.525) 87(1.75,10.525) 88(1.25,10.525) 89(0.75,10.525) 90(0.25,10.525) 91(-0.25,10.525) 92(-0.75,10.525) 93(-1.25,10.525) 94(-1.75,10.525) 95(-2.25,10.525) 96(-2.75,10.525) 97(-3.25,10.525) 98(-3.75,10.525) 99(-4.25,10.525) 100(-4.75,10.525) 101(-5.25,10.525) 102(-5.75,10.525) 103(-6.25,10.525) 104(-6.75,10.525) 105(-7.25,10.525) 106(-7.75,10.525) 107(-8.25,10.525) 108(-8.75,10.525)
  oval 1.5x0.25 smd: 37(10.525,-8.75) 38(10.525,-8.25) 39(10.525,-7.75) 40(10.525,-7.25) 41(10.525,-6.75) 42(10.525,-6.25) 43(10.525,-5.75) 44(10.525,-5.25) 45(10.525,-4.75) 46(10.525,-4.25) 47(10.525,-3.75) 48(10.525,-3.25) 49(10.525,-2.75) 50(10.525,-2.25) 51(10.525,-1.75) 52(10.525,-1.25) 53(10.525,-0.75) 54(10.525,-0.25) 55(10.525,0.25) 56(10.525,0.75) 57(10.525,1.25) 58(10.525,1.75) 59(10.525,2.25) 60(10.525,2.75) 61(10.525,3.25) 62(10.525,3.75) 63(10.525,4.25) 64(10.525,4.75) 65(10.525,5.25) 66(10.525,5.75) 67(10.525,6.25) 68(10.525,6.75) 69(10.525,7.25) 70(10.525,7.75) 71(10.525,8.25) 72(10.525,8.75) 109(-10.525,8.75) 110(-10.525,8.25) 111(-10.525,7.75) 112(-10.525,7.25) 113(-10.525,6.75) 114(-10.525,6.25) 115(-10.525,5.75) 116(-10.525,5.25) 117(-10.525,4.75) 118(-10.525,4.25) 119(-10.525,3.75) 120(-10.525,3.25) 121(-10.525,2.75) 122(-10.525,2.25) 123(-10.525,1.75) 124(-10.525,1.25) 125(-10.525,0.75) 126(-10.525,0.25) 127(-10.525,-0.25) 128(-10.525,-0.75) 129(-10.525,-1.25) 130(-10.525,-1.75) 131(-10.525,-2.25) 132(-10.525,-2.75) 133(-10.525,-3.25) 134(-10.525,-3.75) 135(-10.525,-4.25) 136(-10.525,-4.75) 137(-10.525,-5.25) 138(-10.525,-5.75) 139(-10.525,-6.25) 140(-10.525,-6.75) 141(-10.525,-7.25) 142(-10.525,-7.75) 143(-10.525,-8.25) 144(-10.525,-8.75)
Top Overlay:
  circle w0.508: c-9.652,-10.795 r0.127
  circle w0.254: c-7.366,-7.366 r0.889
  lines w0.254: -8.89,-8.89 8.89,-8.89 8.89,8.89 -8.89,8.89 -8.89,-8.89
Mechanical 13:
  circle w0.1: c-9.1,-9.1 r0.5
  lines w0.1: -10,-10 10,-10 10,10 -10,10 -10,-10
Mechanical 15:
  circle w0.05: c0,0 r0.35
  lines w0.05: -0.5,0 0.5,0 ; 0,-0.5 0,0.5
  lines w0.1: -11.557,-11.557 11.557,-11.557 11.557,11.557 -11.557,11.557 -11.557,-11.557
3D body "TQFP144 20x20.STEP": height 1.05, standoff -0.01, extent -11.002,-11.002 11.002,11.002

## TQFP144 20x20_M [mm] "144脚，体宽：20x20mm, 脚距：0.5mm  淘宝ID:黄晶宝石"
height 1.6
pads (144):
  oval 0.35x2.1 smd: 1(-8.75,-10.754) 2(-8.25,-10.754) 3(-7.75,-10.754) 4(-7.25,-10.754) 5(-6.75,-10.754) 6(-6.25,-10.754) 7(-5.75,-10.754) 8(-5.25,-10.754) 9(-4.75,-10.754) 10(-4.25,-10.754) 11(-3.75,-10.754) 12(-3.25,-10.754) 13(-2.75,-10.754) 14(-2.25,-10.754) 15(-1.75,-10.754) 16(-1.25,-10.754) 17(-0.75,-10.754) 18(-0.25,-10.754) 19(0.25,-10.754) 20(0.75,-10.754) 21(1.25,-10.754) 22(1.75,-10.754) 23(2.25,-10.754) 24(2.75,-10.754) 25(3.25,-10.754) 26(3.75,-10.754) 27(4.25,-10.754) 28(4.75,-10.754) 29(5.25,-10.754) 30(5.75,-10.754) 31(6.25,-10.754) 32(6.75,-10.754) 33(7.25,-10.754) 34(7.75,-10.754) 35(8.25,-10.754) 36(8.75,-10.754) 73(8.75,10.754) 74(8.25,10.754) 75(7.75,10.754) 76(7.25,10.754) 77(6.75,10.754) 78(6.25,10.754) 79(5.75,10.754) 80(5.25,10.754) 81(4.75,10.754) 82(4.25,10.754) 83(3.75,10.754) 84(3.25,10.754) 85(2.75,10.754) 86(2.25,10.754) 87(1.75,10.754) 88(1.25,10.754) 89(0.75,10.754) 90(0.25,10.754) 91(-0.25,10.754) 92(-0.75,10.754) 93(-1.25,10.754) 94(-1.75,10.754) 95(-2.25,10.754) 96(-2.75,10.754) 97(-3.25,10.754) 98(-3.75,10.754) 99(-4.25,10.754) 100(-4.75,10.754) 101(-5.25,10.754) 102(-5.75,10.754) 103(-6.25,10.754) 104(-6.75,10.754) 105(-7.25,10.754) 106(-7.75,10.754) 107(-8.25,10.754) 108(-8.75,10.754)
  oval 2.1x0.35 smd: 37(10.754,-8.75) 38(10.754,-8.25) 39(10.754,-7.75) 40(10.754,-7.25) 41(10.754,-6.75) 42(10.754,-6.25) 43(10.754,-5.75) 44(10.754,-5.25) 45(10.754,-4.75) 46(10.754,-4.25) 47(10.754,-3.75) 48(10.754,-3.25) 49(10.754,-2.75) 50(10.754,-2.25) 51(10.754,-1.75) 52(10.754,-1.25) 53(10.754,-0.75) 54(10.754,-0.25) 55(10.754,0.25) 56(10.754,0.75) 57(10.754,1.25) 58(10.754,1.75) 59(10.754,2.25) 60(10.754,2.75) 61(10.754,3.25) 62(10.754,3.75) 63(10.754,4.25) 64(10.754,4.75) 65(10.754,5.25) 66(10.754,5.75) 67(10.754,6.25) 68(10.754,6.75) 69(10.754,7.25) 70(10.754,7.75) 71(10.754,8.25) 72(10.754,8.75) 109(-10.754,8.75) 110(-10.754,8.25) 111(-10.754,7.75) 112(-10.754,7.25) 113(-10.754,6.75) 114(-10.754,6.25) 115(-10.754,5.75) 116(-10.754,5.25) 117(-10.754,4.75) 118(-10.754,4.25) 119(-10.754,3.75) 120(-10.754,3.25) 121(-10.754,2.75) 122(-10.754,2.25) 123(-10.754,1.75) 124(-10.754,1.25) 125(-10.754,0.75) 126(-10.754,0.25) 127(-10.754,-0.25) 128(-10.754,-0.75) 129(-10.754,-1.25) 130(-10.754,-1.75) 131(-10.754,-2.25) 132(-10.754,-2.75) 133(-10.754,-3.25) 134(-10.754,-3.75) 135(-10.754,-4.25) 136(-10.754,-4.75) 137(-10.754,-5.25) 138(-10.754,-5.75) 139(-10.754,-6.25) 140(-10.754,-6.75) 141(-10.754,-7.25) 142(-10.754,-7.75) 143(-10.754,-8.25) 144(-10.754,-8.75)
Top Overlay:
  circle w0.254: c-7.366,-7.366 r0.889
  circle w0.508: c-9.652,-11.303 r0.127
  lines w0.254: -8.89,-8.89 -8.89,8.89 8.89,8.89 8.89,-8.89 -8.89,-8.89
Mechanical 13:
  circle w0.1: c-9.1,-9.1 r0.5
  lines w0.1: -10,-10 -10,10 10,10 10,-10 -10,-10
Mechanical 15:
  circle w0.05: c0,0 r0.35
  lines w0.05: -0.5,0 0.5,0 ; 0,-0.5 0,0.5
  lines w0.1: -12.065,-12.065 -12.065,12.065 12.065,12.065 12.065,-12.065 -12.065,-12.065
3D body "TQFP144 20x20.STEP": height 1.05, standoff -0.01, extent -11.002,-11.002 11.002,11.002

## TQFP144 20x20_N [mm] "144脚，体宽：20x20mm, 脚距：0.5mm"
height 1.6
pads (144):
  oval 0.3x1.8 smd: 1(-8.75,-10.576) 2(-8.25,-10.576) 3(-7.75,-10.576) 4(-7.25,-10.576) 5(-6.75,-10.576) 6(-6.25,-10.576) 7(-5.75,-10.576) 8(-5.25,-10.576) 9(-4.75,-10.576) 10(-4.25,-10.576) 11(-3.75,-10.576) 12(-3.25,-10.576) 13(-2.75,-10.576) 14(-2.25,-10.576) 15(-1.75,-10.576) 16(-1.25,-10.576) 17(-0.75,-10.576) 18(-0.25,-10.576) 19(0.25,-10.576) 20(0.75,-10.576) 21(1.25,-10.576) 22(1.75,-10.576) 23(2.25,-10.576) 24(2.75,-10.576) 25(3.25,-10.576) 26(3.75,-10.576) 27(4.25,-10.576) 28(4.75,-10.576) 29(5.25,-10.576) 30(5.75,-10.576) 31(6.25,-10.576) 32(6.75,-10.576) 33(7.25,-10.576) 34(7.75,-10.576) 35(8.25,-10.576) 36(8.75,-10.576) 73(8.75,10.576) 74(8.25,10.576) 75(7.75,10.576) 76(7.25,10.576) 77(6.75,10.576) 78(6.25,10.576) 79(5.75,10.576) 80(5.25,10.576) 81(4.75,10.576) 82(4.25,10.576) 83(3.75,10.576) 84(3.25,10.576) 85(2.75,10.576) 86(2.25,10.576) 87(1.75,10.576) 88(1.25,10.576) 89(0.75,10.576) 90(0.25,10.576) 91(-0.25,10.576) 92(-0.75,10.576) 93(-1.25,10.576) 94(-1.75,10.576) 95(-2.25,10.576) 96(-2.75,10.576) 97(-3.25,10.576) 98(-3.75,10.576) 99(-4.25,10.576) 100(-4.75,10.576) 101(-5.25,10.576) 102(-5.75,10.576) 103(-6.25,10.576) 104(-6.75,10.576) 105(-7.25,10.576) 106(-7.75,10.576) 107(-8.25,10.576) 108(-8.75,10.576)
  oval 1.8x0.3 smd: 37(10.576,-8.75) 38(10.576,-8.25) 39(10.576,-7.75) 40(10.576,-7.25) 41(10.576,-6.75) 42(10.576,-6.25) 43(10.576,-5.75) 44(10.576,-5.25) 45(10.576,-4.75) 46(10.576,-4.25) 47(10.576,-3.75) 48(10.576,-3.25) 49(10.576,-2.75) 50(10.576,-2.25) 51(10.576,-1.75) 52(10.576,-1.25) 53(10.576,-0.75) 54(10.576,-0.25) 55(10.576,0.25) 56(10.576,0.75) 57(10.576,1.25) 58(10.576,1.75) 59(10.576,2.25) 60(10.576,2.75) 61(10.576,3.25) 62(10.576,3.75) 63(10.576,4.25) 64(10.576,4.75) 65(10.576,5.25) 66(10.576,5.75) 67(10.576,6.25) 68(10.576,6.75) 69(10.576,7.25) 70(10.576,7.75) 71(10.576,8.25) 72(10.576,8.75) 109(-10.576,8.75) 110(-10.576,8.25) 111(-10.576,7.75) 112(-10.576,7.25) 113(-10.576,6.75) 114(-10.576,6.25) 115(-10.576,5.75) 116(-10.576,5.25) 117(-10.576,4.75) 118(-10.576,4.25) 119(-10.576,3.75) 120(-10.576,3.25) 121(-10.576,2.75) 122(-10.576,2.25) 123(-10.576,1.75) 124(-10.576,1.25) 125(-10.576,0.75) 126(-10.576,0.25) 127(-10.576,-0.25) 128(-10.576,-0.75) 129(-10.576,-1.25) 130(-10.576,-1.75) 131(-10.576,-2.25) 132(-10.576,-2.75) 133(-10.576,-3.25) 134(-10.576,-3.75) 135(-10.576,-4.25) 136(-10.576,-4.75) 137(-10.576,-5.25) 138(-10.576,-5.75) 139(-10.576,-6.25) 140(-10.576,-6.75) 141(-10.576,-7.25) 142(-10.576,-7.75) 143(-10.576,-8.25) 144(-10.576,-8.75)
Top Overlay:
  circle w0.508: c-9.652,-11.049 r0.127
  circle w0.254: c-7.366,-7.366 r0.889
  lines w0.254: -8.89,-8.89 8.89,-8.89 8.89,8.89 -8.89,8.89 -8.89,-8.89
Mechanical 13:
  circle w0.1: c-9.1,-9.1 r0.5
  lines w0.1: -10,-10 10,-10 10,10 -10,10 -10,-10
Mechanical 15:
  circle w0.05: c0,0 r0.35
  lines w0.05: -0.5,0 0.5,0 ; 0,-0.5 0,0.5
  lines w0.1: -11.684,-11.684 11.684,-11.684 11.684,11.684 -11.684,11.684 -11.684,-11.684
3D body "TQFP144 20x20.STEP": height 1.05, standoff -0.01, extent -11.002,-11.002 11.002,11.002

## TQFP144-20*20 [mm] "20x20mm, 0.5mm      封装库来自淘宝卖家 ID：黄晶宝石"
pads (144):
  oval 0.3x1.8 smd: 1(-8.75,-10.576) 2(-8.25,-10.576) 3(-7.75,-10.576) 4(-7.25,-10.576) 5(-6.75,-10.576) 6(-6.25,-10.576) 7(-5.75,-10.576) 8(-5.25,-10.576) 9(-4.75,-10.576) 10(-4.25,-10.576) 11(-3.75,-10.576) 12(-3.25,-10.576) 13(-2.75,-10.576) 14(-2.25,-10.576) 15(-1.75,-10.576) 16(-1.25,-10.576) 17(-0.75,-10.576) 18(-0.25,-10.576) 19(0.25,-10.576) 20(0.75,-10.576) 21(1.25,-10.576) 22(1.75,-10.576) 23(2.25,-10.576) 24(2.75,-10.576) 25(3.25,-10.576) 26(3.75,-10.576) 27(4.25,-10.576) 28(4.75,-10.576) 29(5.25,-10.576) 30(5.75,-10.576) 31(6.25,-10.576) 32(6.75,-10.576) 33(7.25,-10.576) 34(7.75,-10.576) 35(8.25,-10.576) 36(8.75,-10.576) 73(8.75,10.576) 74(8.25,10.576) 75(7.75,10.576) 76(7.25,10.576) 77(6.75,10.576) 78(6.25,10.576) 79(5.75,10.576) 80(5.25,10.576) 81(4.75,10.576) 82(4.25,10.576) 83(3.75,10.576) 84(3.25,10.576) 85(2.75,10.576) 86(2.25,10.576) 87(1.75,10.576) 88(1.25,10.576) 89(0.75,10.576) 90(0.25,10.576) 91(-0.25,10.576) 92(-0.75,10.576) 93(-1.25,10.576) 94(-1.75,10.576) 95(-2.25,10.576) 96(-2.75,10.576) 97(-3.25,10.576) 98(-3.75,10.576) 99(-4.25,10.576) 100(-4.75,10.576) 101(-5.25,10.576) 102(-5.75,10.576) 103(-6.25,10.576) 104(-6.75,10.576) 105(-7.25,10.576) 106(-7.75,10.576) 107(-8.25,10.576) 108(-8.75,10.576)
  oval 1.8x0.3 smd: 37(10.576,-8.75) 38(10.576,-8.25) 39(10.576,-7.75) 40(10.576,-7.25) 41(10.576,-6.75) 42(10.576,-6.25) 43(10.576,-5.75) 44(10.576,-5.25) 45(10.576,-4.75) 46(10.576,-4.25) 47(10.576,-3.75) 48(10.576,-3.25) 49(10.576,-2.75) 50(10.576,-2.25) 51(10.576,-1.75) 52(10.576,-1.25) 53(10.576,-0.75) 54(10.576,-0.25) 55(10.576,0.25) 56(10.576,0.75) 57(10.576,1.25) 58(10.576,1.75) 59(10.576,2.25) 60(10.576,2.75) 61(10.576,3.25) 62(10.576,3.75) 63(10.576,4.25) 64(10.576,4.75) 65(10.576,5.25) 66(10.576,5.75) 67(10.576,6.25) 68(10.576,6.75) 69(10.576,7.25) 70(10.576,7.75) 71(10.576,8.25) 72(10.576,8.75) 109(-10.576,8.75) 110(-10.576,8.25) 111(-10.576,7.75) 112(-10.576,7.25) 113(-10.576,6.75) 114(-10.576,6.25) 115(-10.576,5.75) 116(-10.576,5.25) 117(-10.576,4.75) 118(-10.576,4.25) 119(-10.576,3.75) 120(-10.576,3.25) 121(-10.576,2.75) 122(-10.576,2.25) 123(-10.576,1.75) 124(-10.576,1.25) 125(-10.576,0.75) 126(-10.576,0.25) 127(-10.576,-0.25) 128(-10.576,-0.75) 129(-10.576,-1.25) 130(-10.576,-1.75) 131(-10.576,-2.25) 132(-10.576,-2.75) 133(-10.576,-3.25) 134(-10.576,-3.75) 135(-10.576,-4.25) 136(-10.576,-4.75) 137(-10.576,-5.25) 138(-10.576,-5.75) 139(-10.576,-6.25) 140(-10.576,-6.75) 141(-10.576,-7.25) 142(-10.576,-7.75) 143(-10.576,-8.25) 144(-10.576,-8.75)
Top Overlay:
  circle w0.508: c-9.652,-11.049 r0.127
  lines w0.254: -8.89,-8.89 -8.89,8.89 8.89,8.89 8.89,-8.89 -8.89,-8.89
3D body "TQFP144_20x20.STEP": height 1.05, standoff 0, extent -11.002,-11.002 11.002,11.002

## TQFP144_L [mm] "Thin QFP, 144-Leads, Body 20x20mm, Pitch 0.5mm, IPC High Density"
height 1.6
pads (144):
  oval 1.55x0.25 smd: 1(-10.525,8.75) 2(-10.525,8.25) 3(-10.525,7.75) 4(-10.525,7.25) 5(-10.525,6.75) 6(-10.525,6.25) 7(-10.525,5.75) 8(-10.525,5.25) 9(-10.525,4.75) 10(-10.525,4.25) 11(-10.525,3.75) 12(-10.525,3.25) 13(-10.525,2.75) 14(-10.525,2.25) 15(-10.525,1.75) 16(-10.525,1.25) 17(-10.525,0.75) 18(-10.525,0.25) 19(-10.525,-0.25) 20(-10.525,-0.75) 21(-10.525,-1.25) 22(-10.525,-1.75) 23(-10.525,-2.25) 24(-10.525,-2.75) 25(-10.525,-3.25) 26(-10.525,-3.75) 27(-10.525,-4.25) 28(-10.525,-4.75) 29(-10.525,-5.25) 30(-10.525,-5.75) 31(-10.525,-6.25) 32(-10.525,-6.75) 33(-10.525,-7.25) 34(-10.525,-7.75) 35(-10.525,-8.25) 36(-10.525,-8.75) 73(10.525,-8.75) 74(10.525,-8.25) 75(10.525,-7.75) 76(10.525,-7.25) 77(10.525,-6.75) 78(10.525,-6.25) 79(10.525,-5.75) 80(10.525,-5.25) 81(10.525,-4.75) 82(10.525,-4.25) 83(10.525,-3.75) 84(10.525,-3.25) 85(10.525,-2.75) 86(10.525,-2.25) 87(10.525,-1.75) 88(10.525,-1.25) 89(10.525,-0.75) 90(10.525,-0.25) 91(10.525,0.25) 92(10.525,0.75) 93(10.525,1.25) 94(10.525,1.75) 95(10.525,2.25) 96(10.525,2.75) 97(10.525,3.25) 98(10.525,3.75) 99(10.525,4.25) 100(10.525,4.75) 101(10.525,5.25) 102(10.525,5.75) 103(10.525,6.25) 104(10.525,6.75) 105(10.525,7.25) 106(10.525,7.75) 107(10.525,8.25) 108(10.525,8.75)
  oval 0.25x1.55 smd: 37(-8.75,-10.525) 38(-8.25,-10.525) 39(-7.75,-10.525) 40(-7.25,-10.525) 41(-6.75,-10.525) 42(-6.25,-10.525) 43(-5.75,-10.525) 44(-5.25,-10.525) 45(-4.75,-10.525) 46(-4.25,-10.525) 47(-3.75,-10.525) 48(-3.25,-10.525) 49(-2.75,-10.525) 50(-2.25,-10.525) 51(-1.75,-10.525) 52(-1.25,-10.525) 53(-0.75,-10.525) 54(-0.25,-10.525) 55(0.25,-10.525) 56(0.75,-10.525) 57(1.25,-10.525) 58(1.75,-10.525) 59(2.25,-10.525) 60(2.75,-10.525) 61(3.25,-10.525) 62(3.75,-10.525) 63(4.25,-10.525) 64(4.75,-10.525) 65(5.25,-10.525) 66(5.75,-10.525) 67(6.25,-10.525) 68(6.75,-10.525) 69(7.25,-10.525) 70(7.75,-10.525) 71(8.25,-10.525) 72(8.75,-10.525) 109(8.75,10.525) 110(8.25,10.525) 111(7.75,10.525) 112(7.25,10.525) 113(6.75,10.525) 114(6.25,10.525) 115(5.75,10.525) 116(5.25,10.525) 117(4.75,10.525) 118(4.25,10.525) 119(3.75,10.525) 120(3.25,10.525) 121(2.75,10.525) 122(2.25,10.525) 123(1.75,10.525) 124(1.25,10.525) 125(0.75,10.525) 126(0.25,10.525) 127(-0.25,10.525) 128(-0.75,10.525) 129(-1.25,10.525) 130(-1.75,10.525) 131(-2.25,10.525) 132(-2.75,10.525) 133(-3.25,10.525) 134(-3.75,10.525) 135(-4.25,10.525) 136(-4.75,10.525) 137(-5.25,10.525) 138(-5.75,10.525) 139(-6.25,10.525) 140(-6.75,10.525) 141(-7.25,10.525) 142(-7.75,10.525) 143(-8.25,10.525) 144(-8.75,10.525)
Top Overlay:
  circle w0.25: c-10.525,9.425 r0.125
  circle w0.6: c-8.35,8.35 r0.3
  lines w0.2: -9.35,-9.35 -9.35,9.35 9.35,9.35 9.35,-9.35 -9.35,-9.35
Mechanical 13:
  circle w0.1: c-9.1,9.1 r0.5
  lines w0.1: -10,-10 -10,10 10,10 10,-10 -10,-10
Mechanical 15:
  lines w0.05: -11.4,-11.4 -11.4,11.4 11.4,11.4 11.4,-11.4 -11.4,-11.4
  lines w0.1: -0.5,0 0.5,0 ; 0,-0.5 0,0.5
3D body: height 1.6, standoff 0, extent -10,-10 10,10

## TQFP144_M [mm] "Thin QFP, 144-Leads, Body 20x20mm, Pitch 0.5mm, IPC Low Density"
height 1.6
pads (144):
  oval 2.1x0.3 smd: 1(-10.6,8.75) 2(-10.6,8.25) 3(-10.6,7.75) 4(-10.6,7.25) 5(-10.6,6.75) 6(-10.6,6.25) 7(-10.6,5.75) 8(-10.6,5.25) 9(-10.6,4.75) 10(-10.6,4.25) 11(-10.6,3.75) 12(-10.6,3.25) 13(-10.6,2.75) 14(-10.6,2.25) 15(-10.6,1.75) 16(-10.6,1.25) 17(-10.6,0.75) 18(-10.6,0.25) 19(-10.6,-0.25) 20(-10.6,-0.75) 21(-10.6,-1.25) 22(-10.6,-1.75) 23(-10.6,-2.25) 24(-10.6,-2.75) 25(-10.6,-3.25) 26(-10.6,-3.75) 27(-10.6,-4.25) 28(-10.6,-4.75) 29(-10.6,-5.25) 30(-10.6,-5.75) 31(-10.6,-6.25) 32(-10.6,-6.75) 33(-10.6,-7.25) 34(-10.6,-7.75) 35(-10.6,-8.25) 36(-10.6,-8.75) 73(10.6,-8.75) 74(10.6,-8.25) 75(10.6,-7.75) 76(10.6,-7.25) 77(10.6,-6.75) 78(10.6,-6.25) 79(10.6,-5.75) 80(10.6,-5.25) 81(10.6,-4.75) 82(10.6,-4.25) 83(10.6,-3.75) 84(10.6,-3.25) 85(10.6,-2.75) 86(10.6,-2.25) 87(10.6,-1.75) 88(10.6,-1.25) 89(10.6,-0.75) 90(10.6,-0.25) 91(10.6,0.25) 92(10.6,0.75) 93(10.6,1.25) 94(10.6,1.75) 95(10.6,2.25) 96(10.6,2.75) 97(10.6,3.25) 98(10.6,3.75) 99(10.6,4.25) 100(10.6,4.75) 101(10.6,5.25) 102(10.6,5.75) 103(10.6,6.25) 104(10.6,6.75) 105(10.6,7.25) 106(10.6,7.75) 107(10.6,8.25) 108(10.6,8.75)
  oval 0.3x2.1 smd: 37(-8.75,-10.6) 38(-8.25,-10.6) 39(-7.75,-10.6) 40(-7.25,-10.6) 41(-6.75,-10.6) 42(-6.25,-10.6) 43(-5.75,-10.6) 44(-5.25,-10.6) 45(-4.75,-10.6) 46(-4.25,-10.6) 47(-3.75,-10.6) 48(-3.25,-10.6) 49(-2.75,-10.6) 50(-2.25,-10.6) 51(-1.75,-10.6) 52(-1.25,-10.6) 53(-0.75,-10.6) 54(-0.25,-10.6) 55(0.25,-10.6) 56(0.75,-10.6) 57(1.25,-10.6) 58(1.75,-10.6) 59(2.25,-10.6) 60(2.75,-10.6) 61(3.25,-10.6) 62(3.75,-10.6) 63(4.25,-10.6) 64(4.75,-10.6) 65(5.25,-10.6) 66(5.75,-10.6) 67(6.25,-10.6) 68(6.75,-10.6) 69(7.25,-10.6) 70(7.75,-10.6) 71(8.25,-10.6) 72(8.75,-10.6) 109(8.75,10.6) 110(8.25,10.6) 111(7.75,10.6) 112(7.25,10.6) 113(6.75,10.6) 114(6.25,10.6) 115(5.75,10.6) 116(5.25,10.6) 117(4.75,10.6) 118(4.25,10.6) 119(3.75,10.6) 120(3.25,10.6) 121(2.75,10.6) 122(2.25,10.6) 123(1.75,10.6) 124(1.25,10.6) 125(0.75,10.6) 126(0.25,10.6) 127(-0.25,10.6) 128(-0.75,10.6) 129(-1.25,10.6) 130(-1.75,10.6) 131(-2.25,10.6) 132(-2.75,10.6) 133(-3.25,10.6) 134(-3.75,10.6) 135(-4.25,10.6) 136(-4.75,10.6) 137(-5.25,10.6) 138(-5.75,10.6) 139(-6.25,10.6) 140(-6.75,10.6) 141(-7.25,10.6) 142(-7.75,10.6) 143(-8.25,10.6) 144(-8.75,10.6)
Top Overlay:
  circle w0.25: c-10.6,9.45 r0.125
  circle w0.6: c-8.15,8.15 r0.3
  lines w0.2: -9.15,-9.15 -9.15,9.15 9.15,9.15 9.15,-9.15 -9.15,-9.15
Mechanical 13:
  circle w0.1: c-9.1,9.1 r0.5
  lines w0.1: -10,-10 -10,10 10,10 10,-10 -10,-10
Mechanical 15:
  lines w0.05: -12.15,-12.15 -12.15,12.15 12.15,12.15 12.15,-12.15 -12.15,-12.15
  lines w0.1: -0.5,0 0.5,0 ; 0,-0.5 0,0.5
3D body: height 1.6, standoff 0, extent -10,-10 10,10

## TQFP144_N [mm] "Thin QFP, 144-Leads, Body 20x20mm, Pitch 0.5mm, IPC Medium Density"
height 1.6
pads (144):
  oval 1.8x0.3 smd: 1(-10.55,8.75) 2(-10.55,8.25) 3(-10.55,7.75) 4(-10.55,7.25) 5(-10.55,6.75) 6(-10.55,6.25) 7(-10.55,5.75) 8(-10.55,5.25) 9(-10.55,4.75) 10(-10.55,4.25) 11(-10.55,3.75) 12(-10.55,3.25) 13(-10.55,2.75) 14(-10.55,2.25) 15(-10.55,1.75) 16(-10.55,1.25) 17(-10.55,0.75) 18(-10.55,0.25) 19(-10.55,-0.25) 20(-10.55,-0.75) 21(-10.55,-1.25) 22(-10.55,-1.75) 23(-10.55,-2.25) 24(-10.55,-2.75) 25(-10.55,-3.25) 26(-10.55,-3.75) 27(-10.55,-4.25) 28(-10.55,-4.75) 29(-10.55,-5.25) 30(-10.55,-5.75) 31(-10.55,-6.25) 32(-10.55,-6.75) 33(-10.55,-7.25) 34(-10.55,-7.75) 35(-10.55,-8.25) 36(-10.55,-8.75) 73(10.55,-8.75) 74(10.55,-8.25) 75(10.55,-7.75) 76(10.55,-7.25) 77(10.55,-6.75) 78(10.55,-6.25) 79(10.55,-5.75) 80(10.55,-5.25) 81(10.55,-4.75) 82(10.55,-4.25) 83(10.55,-3.75) 84(10.55,-3.25) 85(10.55,-2.75) 86(10.55,-2.25) 87(10.55,-1.75) 88(10.55,-1.25) 89(10.55,-0.75) 90(10.55,-0.25) 91(10.55,0.25) 92(10.55,0.75) 93(10.55,1.25) 94(10.55,1.75) 95(10.55,2.25) 96(10.55,2.75) 97(10.55,3.25) 98(10.55,3.75) 99(10.55,4.25) 100(10.55,4.75) 101(10.55,5.25) 102(10.55,5.75) 103(10.55,6.25) 104(10.55,6.75) 105(10.55,7.25) 106(10.55,7.75) 107(10.55,8.25) 108(10.55,8.75)
  oval 0.3x1.8 smd: 37(-8.75,-10.55) 38(-8.25,-10.55) 39(-7.75,-10.55) 40(-7.25,-10.55) 41(-6.75,-10.55) 42(-6.25,-10.55) 43(-5.75,-10.55) 44(-5.25,-10.55) 45(-4.75,-10.55) 46(-4.25,-10.55) 47(-3.75,-10.55) 48(-3.25,-10.55) 49(-2.75,-10.55) 50(-2.25,-10.55) 51(-1.75,-10.55) 52(-1.25,-10.55) 53(-0.75,-10.55) 54(-0.25,-10.55) 55(0.25,-10.55) 56(0.75,-10.55) 57(1.25,-10.55) 58(1.75,-10.55) 59(2.25,-10.55) 60(2.75,-10.55) 61(3.25,-10.55) 62(3.75,-10.55) 63(4.25,-10.55) 64(4.75,-10.55) 65(5.25,-10.55) 66(5.75,-10.55) 67(6.25,-10.55) 68(6.75,-10.55) 69(7.25,-10.55) 70(7.75,-10.55) 71(8.25,-10.55) 72(8.75,-10.55) 109(8.75,10.55) 110(8.25,10.55) 111(7.75,10.55) 112(7.25,10.55) 113(6.75,10.55) 114(6.25,10.55) 115(5.75,10.55) 116(5.25,10.55) 117(4.75,10.55) 118(4.25,10.55) 119(3.75,10.55) 120(3.25,10.55) 121(2.75,10.55) 122(2.25,10.55) 123(1.75,10.55) 124(1.25,10.55) 125(0.75,10.55) 126(0.25,10.55) 127(-0.25,10.55) 128(-0.75,10.55) 129(-1.25,10.55) 130(-1.75,10.55) 131(-2.25,10.55) 132(-2.75,10.55) 133(-3.25,10.55) 134(-3.75,10.55) 135(-4.25,10.55) 136(-4.75,10.55) 137(-5.25,10.55) 138(-5.75,10.55) 139(-6.25,10.55) 140(-6.75,10.55) 141(-7.25,10.55) 142(-7.75,10.55) 143(-8.25,10.55) 144(-8.75,10.55)
Top Overlay:
  circle w0.25: c-10.55,9.45 r0.125
  circle w0.6: c-8.25,8.25 r0.3
  lines w0.2: -9.25,-9.25 -9.25,9.25 9.25,9.25 9.25,-9.25 -9.25,-9.25
Mechanical 13:
  circle w0.1: c-9.1,9.1 r0.5
  lines w0.1: -10,-10 -10,10 10,10 10,-10 -10,-10
Mechanical 15:
  lines w0.05: -11.7,-11.7 -11.7,11.7 11.7,11.7 11.7,-11.7 -11.7,-11.7
  lines w0.1: -0.5,0 0.5,0 ; 0,-0.5 0,0.5
3D body: height 1.6, standoff 0, extent -10,-10 10,10

## TQFP176 20x20_L [mm] "176脚，体宽：20x20mm, 脚距：0.4mm"
height 1.6
pads (176):
  oval 0.2x1.4 smd: 1(-8.6,-10.552) 2(-8.2,-10.552) 3(-7.8,-10.552) 4(-7.4,-10.552) 5(-7,-10.552) 6(-6.6,-10.552) 7(-6.2,-10.552) 8(-5.8,-10.552) 9(-5.4,-10.552) 10(-5,-10.552) 11(-4.6,-10.552) 12(-4.2,-10.552) 13(-3.8,-10.552) 14(-3.4,-10.552) 15(-3,-10.552) 16(-2.6,-10.552) 17(-2.2,-10.552) 18(-1.8,-10.552) 19(-1.4,-10.552) 20(-1,-10.552) 21(-0.6,-10.552) 22(-0.2,-10.552) 23(0.2,-10.552) 24(0.6,-10.552) 25(1,-10.552) 26(1.4,-10.552) 27(1.8,-10.552) 28(2.2,-10.552) 29(2.6,-10.552) 30(3,-10.552) 31(3.4,-10.552) 32(3.8,-10.552) 33(4.2,-10.552) 34(4.6,-10.552) 35(5,-10.552) 36(5.4,-10.552) 37(5.8,-10.552) 38(6.2,-10.552) 39(6.6,-10.552) 40(7,-10.552) 41(7.4,-10.552) 42(7.8,-10.552) 43(8.2,-10.552) 44(8.6,-10.552) 89(8.6,10.552) 90(8.2,10.552) 91(7.8,10.552) 92(7.4,10.552) 93(7,10.552) 94(6.6,10.552) 95(6.2,10.552) 96(5.8,10.552) 97(5.4,10.552) 98(5,10.552) 99(4.6,10.552) 100(4.2,10.552) 101(3.8,10.552) 102(3.4,10.552) 103(3,10.552) 104(2.6,10.552) 105(2.2,10.552) 106(1.8,10.552) 107(1.4,10.552) 108(1,10.552) 109(0.6,10.552) 110(0.2,10.552) 111(-0.2,10.552) 112(-0.6,10.552) 113(-1,10.552) 114(-1.4,10.552) 115(-1.8,10.552) 116(-2.2,10.552) 117(-2.6,10.552) 118(-3,10.552) 119(-3.4,10.552) 120(-3.8,10.552) 121(-4.2,10.552) 122(-4.6,10.552) 123(-5,10.552) 124(-5.4,10.552) 125(-5.8,10.552) 126(-6.2,10.552) 127(-6.6,10.552) 128(-7,10.552) 129(-7.4,10.552) 130(-7.8,10.552) 131(-8.2,10.552) 132(-8.6,10.552)
  oval 1.4x0.2 smd: 45(10.552,-8.6) 46(10.552,-8.2) 47(10.552,-7.8) 48(10.552,-7.4) 49(10.552,-7) 50(10.552,-6.6) 51(10.552,-6.2) 52(10.552,-5.8) 53(10.552,-5.4) 54(10.552,-5) 55(10.552,-4.6) 56(10.552,-4.2) 57(10.552,-3.8) 58(10.552,-3.4) 59(10.552,-3) 60(10.552,-2.6) 61(10.552,-2.2) 62(10.552,-1.8) 63(10.552,-1.4) 64(10.552,-1) 65(10.552,-0.6) 66(10.552,-0.2) 67(10.552,0.2) 68(10.552,0.6) 69(10.552,1) 70(10.552,1.4) 71(10.552,1.8) 72(10.552,2.2) 73(10.552,2.6) 74(10.552,3) 75(10.552,3.4) 76(10.552,3.8) 77(10.552,4.2) 78(10.552,4.6) 79(10.552,5) 80(10.552,5.4) 81(10.552,5.8) 82(10.552,6.2) 83(10.552,6.6) 84(10.552,7) 85(10.552,7.4) 86(10.552,7.8) 87(10.552,8.2) 88(10.552,8.6) 133(-10.552,8.6) 134(-10.552,8.2) 135(-10.552,7.8) 136(-10.552,7.4) 137(-10.552,7) 138(-10.552,6.6) 139(-10.552,6.2) 140(-10.552,5.8) 141(-10.552,5.4) 142(-10.552,5) 143(-10.552,4.6) 144(-10.552,4.2) 145(-10.552,3.8) 146(-10.552,3.4) 147(-10.552,3) 148(-10.552,2.6) 149(-10.552,2.2) 150(-10.552,1.8) 151(-10.552,1.4) 152(-10.552,1) 153(-10.552,0.6) 154(-10.552,0.2) 155(-10.552,-0.2) 156(-10.552,-0.6) 157(-10.552,-1) 158(-10.552,-1.4) 159(-10.552,-1.8) 160(-10.552,-2.2) 161(-10.552,-2.6) 162(-10.552,-3) 163(-10.552,-3.4) 164(-10.552,-3.8) 165(-10.552,-4.2) 166(-10.552,-4.6) 167(-10.552,-5) 168(-10.552,-5.4) 169(-10.552,-5.8) 170(-10.552,-6.2) 171(-10.552,-6.6) 172(-10.552,-7) 173(-10.552,-7.4) 174(-10.552,-7.8) 175(-10.552,-8.2) 176(-10.552,-8.6)
Top Overlay:
  circle w0.254: c-7.112,-7.112 r1.016
  circle w0.508: c-9.398,-10.922 r0.127
  lines w0.254: -8.89,-8.89 -8.89,8.89 8.89,8.89 8.89,-8.89 -8.89,-8.89
Mechanical 13:
  circle w0.1: c-8.894,-8.894 r0.5
  lines w0.15: -10,-10 10,-10 10,10 -10,10 -10,-10
Mechanical 15:
  circle w0.05: c0,0 r0.35
  lines w0.05: -0.5,0 0.5,0 ; 0,-0.5 0,0.5
  lines w0.15: -11.557,-11.557 -11.557,11.557 11.557,11.557 11.557,-11.557 -11.557,-11.557
3D body "TQFP176 20x20.STEP": height 1.05, standoff -0.01, extent -11.002,-11.002 11.002,11.002